# Altium schematic symbol library Schlib1.SchLib: 44 symbols
Pins are listed as number, name and electrical type; pins without a type are passive.

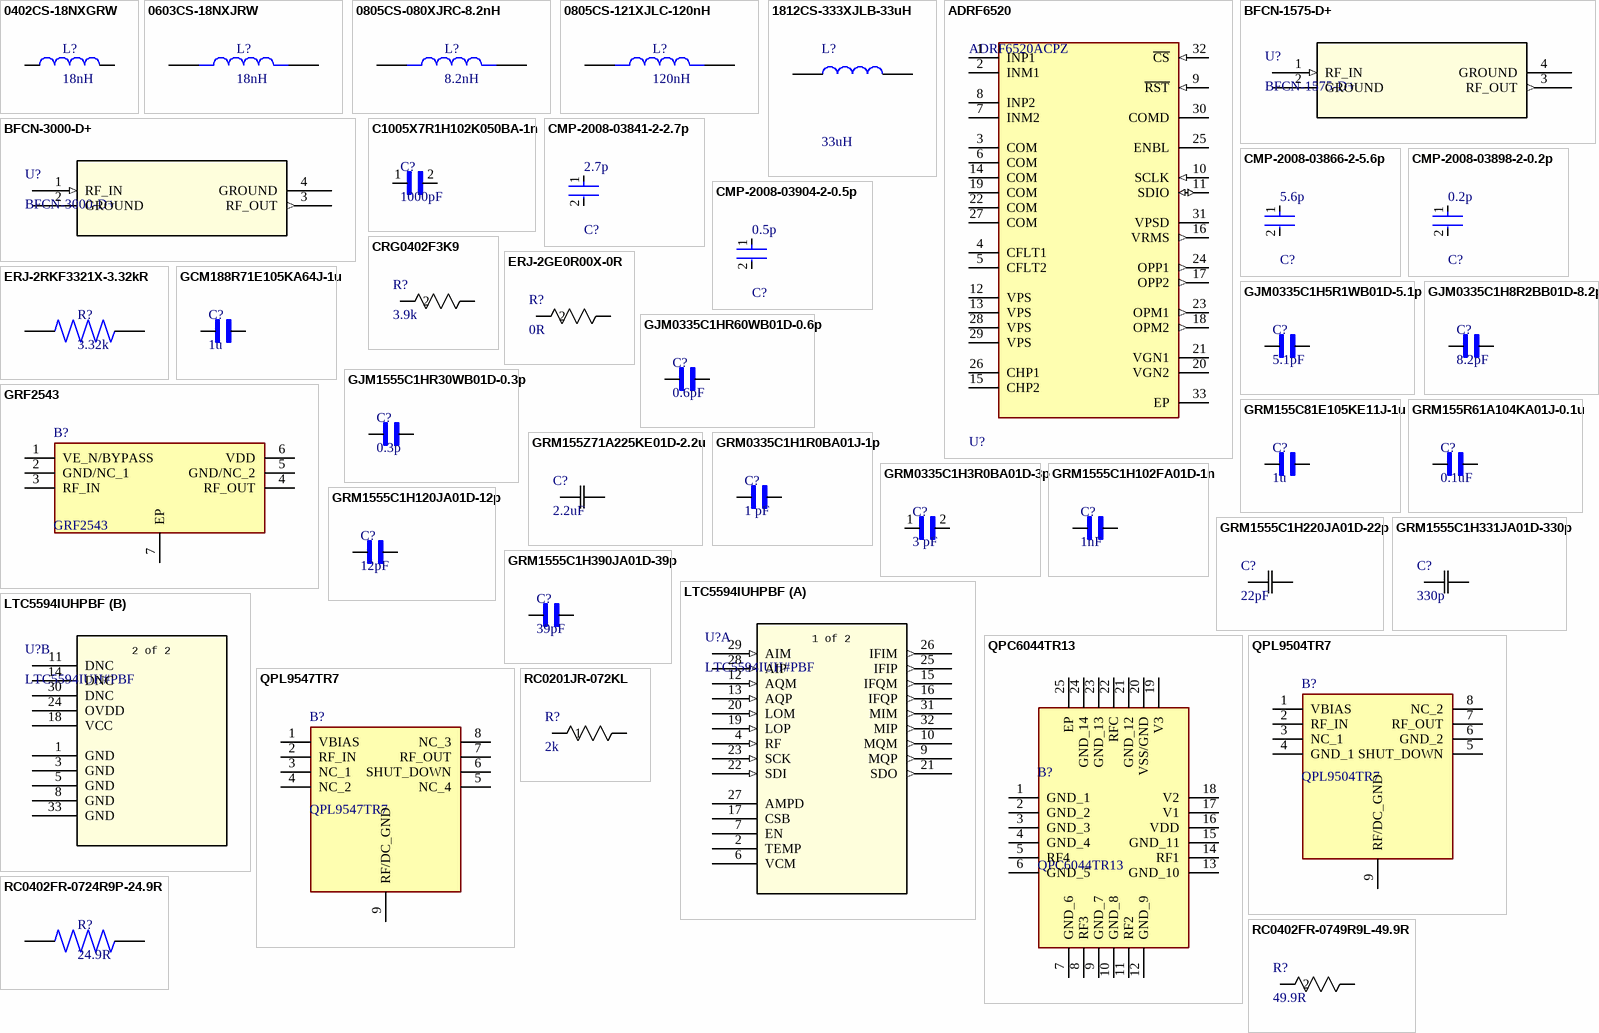
[diagram p0: symbols 0402CS-18NXGRW to RC0402FR-0749R9L-49.9R]

## 0402CS-18NXGRW
designator L?, comment 18nH
MP: 0402CS-18NXGRW; Package: None; Price: None; Value: *; Availability: Unavailable
footprint IND_0402CS-18NXGRW
pins: 1, 2

## 0603CS-18NXJRW
designator L?, comment 18nH
MP: 0603CS-18NXJRW; Package: None; Price: None; Value: *; Availability: Unavailable
footprint IND_0603CS-18NXJRW
pins: 1, 2

## 0805CS-080XJRC-8.2nH
designator L?, comment 8.2nH
MP: 0603CS-18NXJRW; Package: None; Price: None; Value: *; Availability: Unavailable
pins: 1, 2

## 0805CS-121XJLC-120nH
designator L?, comment 120nH
MP: 0603CS-18NXJRW; Package: None; Price: None; Value: *; Availability: Unavailable
pins: 1, 2

## 1812CS-333XJLB-33uH
designator L?, comment 33uH
Fixed Inductors 1812CS AEC-Q200 33 uH 5 % 0.15 A; Manufacturer_Name: COILCRAFT; Manufacturer_Part_Number: 1812CS-333XJLB; Geometry.Height: 3.43mm; Mouser Part Number: 994-1812CS-333XJLB; Mouser Price/Stock: https://www.mouser.com/Search/Refine.aspx?Keyword=994-1812CS-333XJLB; Datasheet Link: https://componentsearchengine.com/Datasheets/1/1812CS-333XJLB.pdf
footprint INDC5038X343N
pins: 1, 2

## ADRF6520
designator U?, comment ADRF6520ACPZ
IC RF AMP 1.25GHZ 32LFCSP; Noise Figure: 10.5dB; P1dB: 14dBm; Gain: 53dB; Frequency: 2GHz; Operating Supply Current: 425mA; Packaging: Tray; Number of Pins: 32; Test Frequency: 2GHz
footprint FP-CP-32-12-IPC_A
pins: 1 INP1, 2 INM1, 3 COM, 4 CFLT1, 5 CFLT2, 6 COM, 7 INM2, 8 INP2, 9 ~{RST} (in), 10 SCLK (in), 11 SDIO (io), 12 VPS (power), 13 VPS (power), 14 COM, 15 CHP2, 16 VRMS (out), 17 OPP2 (out), 18 OPM2 (out), 19 COM, 20 VGN2, 21 VGN1, 22 COM, 23 OPM1 (out), 24 OPP1 (out), 25 ENBL, 26 CHP1, 27 COM, 28 VPS (power), 29 VPS (power), 30 COMD, 31 VPSD (power), 32 ~{CS} (in), 33 EP (power)

## BFCN-1575-D+
designator U?
DC to 1575 MHz from Mini Circuit; Manufacturer_Name: Mini Circuits; Manufacturer_Part_Number: BFCN-1575+; Copyright: Copyright (C) 2026 Ultra Librarian. All rights reserved.; RefDes: RefDes; Type: Type
footprint FV1206_MNC
pins: 1 RF_IN (in), 2 GROUND (power), 3 RF_OUT (out), 4 GROUND (power)

## BFCN-3000-D+
designator U?
DC to 3000MHz from mini circuit; Manufacturer_Name: Mini Circuits; Manufacturer_Part_Number: BFCN-1575+; Copyright: Copyright (C) 2026 Ultra Librarian. All rights reserved.; RefDes: RefDes; Type: Type
footprint FV1206_MNC
pins: 1 RF_IN (in), 2 GROUND (power), 3 RF_OUT (out), 4 GROUND (power)

## C1005X7R1H102K050BA-1n
designator C?, comment 1000pF
1000 pF Â±10% 50V Ceramic Capacitor X7R 0402 (1005 Metric); MP: C1005X7R1H102K050BA; MF: TDK; Purchase-URL: https://pricing.snapeda.com/search/part/C1005X7R1H102K050BA/?ref=eda; Package: 1005 TDK; Digi-Key_Part_Number: 445-1256-2-ND; Value: *; Check_prices: https://www.snapeda.com/parts/C1005X7R1H102K050BA/TDK/view-part/?ref=eda; SnapEDA_Link: https://www.snapeda.com/parts/C1005X7R1H102K050BA/TDK/view-part/?ref=snap
footprint CAPC1005X55N
pins: 1, 2

## CMP-2008-03841-2-2.7p
designator C?, comment 2.7p
Multi-Layer Ceramic Capacitor 2.7pF C0G  ±0.25pF 0402 Paper T/R; Voltage: 50V; Insulation Resistance: 10GR; Lead Free: Lead Free; Case Code (Metric): 1005; Min Operating Temperature: -55°C; Case Code (Imperial): 0402; Max Operating Temperature: 125°C; Thickness: 0.022inch; Voltage Rating (DC): 50V; Package Quantity: 1; Termination: SMD/SMT; Dielectric: C0G; Case/Package: 0402; Length: 1mm; Mount: Surface Mount; Height: 0.5mm; Voltage Rating: 50V; Radiation Hardening: No; Width: 0.02inch; Depth: 0.5mm; Packaging: Tape and Reel; Capacitance: 2.7pF
footprint FP-GJM155-0_05-IPC_A
pins: 1, 2

## CMP-2008-03866-2-5.6p
designator C?, comment 5.6p
Multi-Layer Ceramic Capacitor 5.6pF C0G  ±0.25pF 0402 Paper T/R; Voltage Rating: 50V; Lead Free: Lead Free; Radiation Hardening: No; Termination: SMD/SMT; Width: 0.02inch; Capacitance: 5.6pF; Thickness: 0.022inch; Depth: 0.5mm; Max Operating Temperature: 125°C; Package Quantity: 1; Case Code (Imperial): 0402; Case Code (Metric): 1005; Mount: Surface Mount; Voltage: 50V; Packaging: Tape and Reel; Length: 1mm; Voltage Rating (DC): 50V; Case/Package: 0402; Dielectric: C0G; Min Operating Temperature: -55°C; Height: 0.5mm
footprint FP-GJM155-0_05-IPC_A
pins: 1, 2

## CMP-2008-03898-2-0.2p
designator C?, comment 0.2p
Multi-Layer Ceramic Capacitor 0.2pF C0G  ±0.1pF 0402 Paper T/R; Voltage Rating (DC): 50V; Packaging: Tape and Reel; REACH SVHC: No SVHC; Mount: Surface Mount; Thickness: 0.022inch; Height: 0.5mm; Package Quantity: 1; Depth: 0.5mm; Max Operating Temperature: 125°C; Case Code (Imperial): 0402; Number of Pins: 2; Termination: SMD/SMT; Min Operating Temperature: -55°C; Lead Pitch: 0.3mm; Width: 0.5mm; Radiation Hardening: No; Length: 1mm; Voltage Rating: 50V; Dielectric: C0G; Case/Package: 0402; Capacitance: 0.2pF; Lead Free: Lead Free; Case Code (Metric): 1005
footprint FP-GJM155-0_05-IPC_A
pins: 1, 2

## CMP-2008-03904-2-0.5p
designator C?, comment 0.5p
Multi-Layer Ceramic Capacitor 0.5pF C0G  ±0.1pF 0402 Paper T/R; Voltage Rating (DC): 50V; Temperature Coefficient: 30ppm/°C; Lead Pitch: 0.3mm; Max Operating Temperature: 125°C; Thickness: 0.022inch; Termination: SMD/SMT; Depth: 0.5mm; Height: 0.5mm; Voltage Rating: 50V; Length: 1mm; Case/Package: 0402; Radiation Hardening: No; Min Operating Temperature: -55°C; Width: 0.02inch; Voltage: 50V; Number of Pins: 2; REACH SVHC: No SVHC; Case Code (Imperial): 0402; Package Quantity: 1; Mount: Surface Mount; Capacitance: 0.5pF; Dielectric: C0G; Lead Free: Lead Free; Case Code (Metric): 1005; Packaging: Tape and Reel
footprint FP-GJM155-0_05-IPC_A
pins: 1, 2

## CRG0402F3K9
designator R?, comment 3.9k
CRG0402 1% 3K9; Manufacturer_Name: TE Connectivity; Manufacturer_Part_Number: CRG0402F3K9; Copyright: Copyright (C) 2026 Ultra Librarian. All rights reserved.
footprint RES0402_CRG_TYCO_TYC-M
pins: 1, 2

## ERJ-2GE0R00X-0R
designator R?, comment 0R
RESISTOR; 0402; 0 OHM; 0%; JUMPER; 0.10W; THICK FILM; Manufacturer_Name: Panasonic; Manufacturer_Part_Number: ERJ-2GE0R00X; Copyright: Copyright (C) 2025 Ultra Librarian. All rights reserved.
footprint RC0402N_PAN
pins: 1, 2

## ERJ-2RKF3321X-3.32kR
designator R?, comment 3.32k
3.32K OHM 1% 100PPM; MP: ERJ-2RKF3321X; Package: None; Price: None; Value: *; Availability: Unavailable
footprint RESC1005X40N
pins: 1, 2

## GCM188R71E105KA64J-1u
designator C?, comment 1u
1 ÂµF Â±10% 25V Ceramic Capacitor X7R 0603 (1608 Metric); MF: Murata; MP: GCM188R71E105KA64J; SnapEDA_Link: https://www.snapeda.com/parts/GCM188R71E105KA64J/Murata/view-part/?ref=snap; Package: 1608-2 MURATA; Value: *; Check_prices: https://www.snapeda.com/parts/GCM188R71E105KA64J/Murata/view-part/?ref=eda
footprint CAPC1608X90N
pins: 1, 2

## GJM0335C1H5R1WB01D-5.1p
designator C?, comment 5.1pF
SMD capacitor C0G(EIA) with capacitance 5.1pF Tol.0.05pF. Rated voltage 50Vdc 125C; MF: Murata; MP: GJM0335C1H5R1WB01D; SnapEDA_Link: https://www.snapeda.com/parts/GJM0335C1H5R1WB01D/Murata/view-part/?ref=snap; Package: 0603 Taiyo Yuden; Value: *; Check_prices: https://www.snapeda.com/parts/GJM0335C1H5R1WB01D/Murata/view-part/?ref=eda
footprint CAPC0603X33N
pins: 1, 2

## GJM0335C1H8R2BB01D-8.2p
designator C?, comment 8.2pF
SMD capacitor C0G(EIA) with capacitance 8.2pF Tol.0.1pF. Rated voltage 50Vdc 125C; MF: Murata Electronics; MP: GJM0335C1H8R2BB01D; SnapEDA_Link: https://www.snapeda.com/parts/GJM0335C1H8R2BB01D/Murata/view-part/?ref=snap; Package: 0603 Taiyo Yuden; Value: *; Check_prices: https://www.snapeda.com/parts/GJM0335C1H8R2BB01D/Murata/view-part/?ref=eda
footprint CAPC0603X33N
pins: 1, 2

## GJM0335C1HR60WB01D-0.6p
designator C?, comment 0.6pF
SMD capacitor C0G(EIA) with capacitance 0.60pF Tol.0.05pF. Rated voltage 50Vdc 125C; MF: Murata; MP: GJM0335C1HR60WB01D; SnapEDA_Link: https://www.snapeda.com/parts/GJM0335C1HR60WB01D/Murata/view-part/?ref=snap; Package: 0603 Taiyo Yuden; Value: *; Check_prices: https://www.snapeda.com/parts/GJM0335C1HR60WB01D/Murata/view-part/?ref=eda
footprint CAPC0603X33N
pins: 1, 2

## GJM1555C1HR30WB01D-0.3p
designator C?, comment 0.3p
0402 0.3 pF 50V Â±0.05 pF Tolerance C0G SMT Multilayer Ceramic Capacitor; MF: Murata; MP: GJM1555C1HR30WB01D; SnapEDA_Link: https://www.snapeda.com/parts/GJM1555C1HR30WB01D/Murata/view-part/?ref=snap; Package: 1005 Taiyo Yuden; Value: *; Check_prices: https://www.snapeda.com/parts/GJM1555C1HR30WB01D/Murata/view-part/?ref=eda
footprint CAPC1005X55N
pins: 1, 2

## GRF2543
designator B?
RF Amplifier High Gain, LNA with Bypass; IEEE 802.11 a/n/ac/p, 4.9 - 6.0 GHz; Manufacturer_Name: Guerrilla RF; Geometry.Height: 0.45mm; Mouser Part Number: 459-GRF2543; Mouser Price/Stock: https://www.mouser.co.uk/ProductDetail/Guerrilla-RF/GRF2543?qs=PqoDHHvF64%2FihZz%2FtUpOTQ%3D%3D; Manufacturer_Part_Number: GRF2543; Datasheet Link: https://www.guerrilla-rf.com/products/DataSheet?sku=2543&file_name=GRF2543DS.pdf
footprint SON50P150X150X45-7N
pins: 1 VE_N/BYPASS, 2 GND/NC_1, 3 RF_IN, 4 RF_OUT, 5 GND/NC_2, 6 VDD, 7 EP

## GRM155C81E105KE11J-1u
designator C?, comment 1u
SMD Capacitor X6S(EIA) with Capacitance: 1.0uF Tol. 10%. Rated Voltage: 25Vdc 402; MF: Murata; MP: GRM155C81E105KE11J; SnapEDA_Link: https://www.snapeda.com/parts/GRM155C81E105KE11J/Murata/view-part/?ref=snap; Package: 2012 Murata; Value: *; Check_prices: https://www.snapeda.com/parts/GRM155C81E105KE11J/Murata/view-part/?ref=eda
footprint CAPC1005X60N
pins: 1, 2

## GRM155R61A104KA01J-0.1u
designator C?, comment 0.1uF
0402 0.1 uF 10 V Â±10% Tolerance X5R SMT Multilayer Ceramic Capacitor; MF: Murata Electronics; MP: GRM155R61A104KA01J; SnapEDA_Link: https://www.snapeda.com/parts/GRM155R61A104KA01J/Murata+Electronics+North+America/view-part/?ref=snap; Package: 1005-2 Murata; Value: *; Check_prices: https://www.snapeda.com/parts/GRM155R61A104KA01J/Murata+Electronics+North+America/view-part/?ref=eda
footprint CAPC1005X55N
pins: 1, 2

## GRM155Z71A225KE01D-2.2u
designator C?, comment 2.2uF
2.2 µF ±10% 10V Ceramic Capacitor X7R 0402 (1005 Metric); Manufacturer_Name: Murata; Manufacturer_Part_Number: GRM155Z71A225KE01D; Copyright: Copyright (C) 2026 Ultra Librarian. All rights reserved.
footprint CAP_GRM155Z_MUR
pins: 1, 2

## GRM0335C1H1R0BA01J-1p
designator C?, comment 1 pF
SMD capacitor C0G(EIA) with capacitance 1.0pF Tol.0.1pF. Rated voltage 50Vdc 125C; MF: Murata; MP: GRM0335C1H1R0BA01J; SnapEDA_Link: https://www.snapeda.com/parts/GRM0335C1H1R0BA01J/Murata/view-part/?ref=snap; Package: 0603 Murata; Value: *; Check_prices: https://www.snapeda.com/parts/GRM0335C1H1R0BA01J/Murata/view-part/?ref=eda
footprint CAPC0603X33N
pins: 1, 2

## GRM0335C1H3R0BA01D-3p
designator C?, comment 3 pF
SMD capacitor C0G(EIA) with capacitance 3.0pF Tol.0.1pF. Rated voltage 50Vdc 125C; MP: GRM0335C1H3R0BA01D; MF: Murata; SnapEDA_Link: https://www.snapeda.com/parts/GRM0335C1H3R0BA01D/Murata/view-part/?ref=snap; Purchase-URL: https://pricing.snapeda.com/search/part/GRM0335C1H3R0BA01D/?ref=eda; Value: *; Package: 0603 Taiyo Yuden; Digi-Key_Part_Number: 490-11327-1-ND; Check_prices: https://www.snapeda.com/parts/GRM0335C1H3R0BA01D/Murata/view-part/?ref=eda
footprint CAPC0603X33N
pins: 1, 2

## GRM1555C1H102FA01D-1n
designator C?, comment 1nF
SMD capacitor C0G(EIA) with capacitance 1000pF Tol.1%. Rated voltage 50Vdc 125C; MF: Murata; MP: GRM1555C1H102FA01D; SnapEDA_Link: https://www.snapeda.com/parts/GRM1555C1H102FA01D/Murata/view-part/?ref=snap; Package: 1005-2 Murata; Value: *; Check_prices: https://www.snapeda.com/parts/GRM1555C1H102FA01D/Murata/view-part/?ref=eda
footprint CAPC1005X55N
pins: 1, 2

## GRM1555C1H120JA01D-12p
designator C?, comment 12pF
SMD Capacitor C0G(EIA) with Capacitance: 12pF Tol. 5%. Rated Voltage: 50Vdc; MF: Murata; MP: GRM1555C1H120JA01D; SnapEDA_Link: https://www.snapeda.com/parts/GRM1555C1H120JA01D/Murata/view-part/?ref=snap; Package: 1005-2 Murata; Value: *; Check_prices: https://www.snapeda.com/parts/GRM1555C1H120JA01D/Murata/view-part/?ref=eda
footprint CAPC1005X55N
pins: 1, 2

## GRM1555C1H220JA01D-22p
designator C?, comment 22pF
Description; Manufacturer_Name: Murata; Manufacturer_Part_Number: GRM1555C1H220JA01D; Copyright: Copyright (C) 2026 Ultra Librarian. All rights reserved.
footprint G-155_MUR
pins: 1, 2

## GRM1555C1H331JA01D-330p
designator C?, comment 330p
Description; Manufacturer_Name: Murata; Manufacturer_Part_Number: GRM1555C1H331JA01D; Copyright: Copyright (C) 2025 Ultra Librarian. All rights reserved.
footprint G-155_MUR
pins: 1, 2

## GRM1555C1H390JA01D-39p
designator C?, comment 39pF
SMD Capacitor C0G(EIA) with Capacitance: 39pF Tol. 5%. Rated Voltage: 50Vdc; MF: Murata; MP: GRM1555C1H390JA01D; SnapEDA_Link: https://www.snapeda.com/parts/GRM1555C1H390JA01D/Murata/view-part/?ref=snap; Package: 1005-2 Murata; Value: *; Check_prices: https://www.snapeda.com/parts/GRM1555C1H390JA01D/Murata/view-part/?ref=eda
footprint CAPC1005X55N
pins: 1, 2

## LTC5594IUHPBF
designator U?, comment LTC5594IUH#PBF
300MHz to 9GHz High Linearity I/Q Demodulator with Wideband IF Amplifier; Manufacturer_Name: Analog Devices Inc; Copyright: Copyright (C) 2026 Ultra Librarian. All rights reserved.; Manufacturer_Part_Number: LTC5594IUH#PBF; RefDes: RefDes; Type: Type
footprint UH_05-08-1693_ADI
part A pins: 2 TEMP, 4 RF (in), 6 VCM, 7 EN, 9 MQP (out), 10 MQM (out), 12 AQM (in), 13 AQP (in), 15 IFQM (out), 16 IFQP (out), 17 CSB, 19 LOP (in), 20 LOM (in), 21 SDO (out), 22 SDI (in), 23 SCK (in), 25 IFIP (out), 26 IFIM (out), 27 AMPD, 28 AIP (in), 29 AIM (in), 31 MIM (out), 32 MIP (out)
part B pins: 1 GND (power), 3 GND (power), 5 GND (power), 8 GND (power), 11 DNC, 14 DNC, 18 VCC (power), 24 OVDD (power), 30 DNC, 33 GND (power)
part A text: 1 of 2
part B text: 2 of 2

## QPC6044TR13
designator B?
5 - 6000 MHz Absorptive High Isolation SP4T Switch; Manufacturer_Name: Qorvo; Geometry.Height: 0.8mm; Mouser Part Number: 772-QPC6044TR; Mouser Price/Stock: https://www.mouser.co.uk/ProductDetail/Qorvo/QPC6044TR13?qs=AZxAKFb3YN%252BZtJBrTRUA2g%3D%3D; Manufacturer_Part_Number: QPC6044TR13; Datasheet Link: https://www.qorvo.com/products/d/da000272
footprint QFN50P400X400X80-25N-D
pins: 1 GND_1, 2 GND_2, 3 GND_3, 4 GND_4, 5 RF4, 6 GND_5, 7 GND_6, 8 RF3, 9 GND_7, 10 GND_8, 11 RF2, 12 GND_9, 13 GND_10, 14 RF1, 15 GND_11, 16 VDD, 17 V1, 18 V2, 19 V3, 20 VSS/GND, 21 GND_12, 22 RFC, 23 GND_13, 24 GND_14, 25 EP

## QPL9504TR7
designator B?
Ultra Low Noise, Flat Gain LNA; Manufacturer_Name: Qorvo; Geometry.Height: 0.9mm; Manufacturer_Part_Number: QPL9504TR7; Mouser Part Number: 772-QPL9504TR7; Mouser Price/Stock: https://www.mouser.co.uk/ProductDetail/Qorvo/QPL9504TR7?qs=iLbezkQI%252BsiSWi8SJWi3jA%3D%3D; Arrow Part Number: *; Arrow Price/Stock: *; Datasheet Link: https://www.qorvo.com/products/d/da007934
footprint SON50P200X200X90-9N-D
pins: 1 VBIAS, 2 RF_IN, 3 NC_1, 4 GND_1, 5 SHUT_DOWN, 6 GND_2, 7 RF_OUT, 8 NC_2, 9 RF/DC_GND

## QPL9547TR7
designator B?
Ultra Low Noise, Flat Gain LNA; Manufacturer_Name: Qorvo; Geometry.Height: 0.9mm; Manufacturer_Part_Number: QPL9547TR7; Mouser Part Number: 772-QPL9504TR7; Mouser Price/Stock: https://www.mouser.com/en/ProductDetail/Qorvo/QPL9547TR7?qs=7MVldsJ5UaxZMCnAEuCHXA%3D%3D; Arrow Part Number: *; Arrow Price/Stock: *; Datasheet Link: https://www.qorvo.com/products/r/ra006121
footprint SON50P200X200X90-9N-D
pins: 1 VBIAS, 2 RF_IN, 3 NC_1, 4 NC_2, 5 NC_4, 6 SHUT_DOWN, 7 RF_OUT, 8 NC_3, 9 RF/DC_GND

## RC0201JR-072KL
designator R?, comment 2k
No Description Available; Manufacturer_Name: Yageo; Manufacturer_Part_Number: RC0201JR-072KL; Copyright: Copyright (C) 2026 Ultra Librarian. All rights reserved.
footprint RES_RC0201_P6XP3_YAG
pins: 1, 2

## RC0402FR-0724R9P-24.9R
designator R?, comment 24.9R
RES SMD 24.9 OHM 1% 1/16W 0402; MP: RC0402FR-0724R9P; Package: None; Price: None; Value: *; Availability: Unavailable
footprint RESC1005X40N
pins: 1, 2

## RC0402FR-0749R9L-49.9R
designator R?, comment 49.9R
RES, 49.9, 1%, 0.063 W, 0402; Manufacturer_Name: Yageo; Manufacturer_Part_Number: RC0402FR-0749R9L; Copyright: Copyright (C) 2025 Ultra Librarian. All rights reserved.
footprint RC0402N_YAG
pins: 1, 2

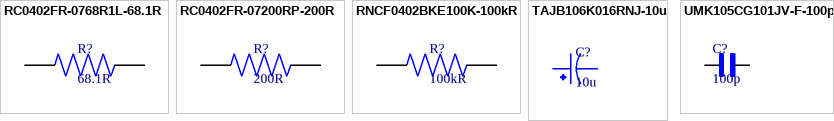
[diagram p1: symbols RC0402FR-0768R1L-68.1R to UMK105CG101JV-F-100p]

## RC0402FR-0768R1L-68.1R
designator R?, comment 68.1R
68.1 Ohms Â±1% 0.063W, 1/16W Chip Resistor 0402 (1005 Metric) Moisture Resistant Thick Film; MF: Yageo; MP: RC0402FR-0768R1L; SnapEDA_Link: https://www.snapeda.com/parts/RC0402FR-0768R1L/Yageo/view-part/?ref=snap; Package: 1005 Panasonic Electronic Components; Value: *; Check_prices: https://www.snapeda.com/parts/RC0402FR-0768R1L/Yageo/view-part/?ref=eda
footprint RESC1005X40N
pins: 1, 2

## RC0402FR-07200RP-200R
designator R?, comment 200R
200 Ohms Â±1% 0.063W, 1/16W Chip Resistor 0402 (1005 Metric) Moisture Resistant Thick Film; MF: Yageo; MP: RC0402FR-07200RP; SnapEDA_Link: https://www.snapeda.com/parts/RC0402FR-07200RP/Yageo/view-part/?ref=snap; Package: 1005 Panasonic Electronic Components; Value: *; Check_prices: https://www.snapeda.com/parts/RC0402FR-07200RP/Yageo/view-part/?ref=eda
footprint RESC1005X40N
pins: 1, 2

## RNCF0402BKE100K-100kR
designator R?, comment 100kR
MPN: RNCF0402BKE100K; Value: *
footprint RESC1005X35N
pins: 1, 2

## TAJB106K016RNJ-10u
designator C?, comment 10u
Cap Tant Solid 10uF 16V B CASE 10% (3.5 X 2.8 X 1.9mm) Inward L SMD 3528-21 2.8 Ohm 125Â°C T/R; MF: KYOCERA AVX; MP: TAJB106K016RNJ; SnapEDA_Link: https://www.snapeda.com/parts/TAJB106K016RNJ/Kyocera/view-part/?ref=snap; Package: Package; Value: *; Check_prices: https://www.snapeda.com/parts/TAJB106K016RNJ/Kyocera/view-part/?ref=eda
footprint CAPPM3528X210N
pins: 1, 2

## UMK105CG101JV-F-100p
designator C?, comment 100p
100 pF Â±5% 50V Ceramic Capacitor C0G, NP0 0402 (1005 Metric); MPN: UMK105CG101JV-F; MANUFACTURER: Taiyo Yuden; Package: 1005 Taiyo Yuden; DATASHEET_URL: https://ds.yuden.co.jp/TYCOMPAS/ut/detail?pn=UMK105CG101JV-F  &u=M; Value: *; SOURCE_URL: https://www.snapeda.com/parts/UMK105CG101JV-F/Taiyo+Yuden/view-part/
footprint CAPC1005X55N
pins: 1, 2